# Altium footprint library FootPrintLib_9.PcbLib: 287 footprints (part 11 of 18)
Each footprint in its own frame and in the unit in brackets; x right, y up, seen from the top. Pads: shape width x height; smd on the part's side, far side on the other; paste and mask are expansions set on the pad; w line width, h text height; cw(c..) or ccw(c..) is an arc to the next point about the centre after c.
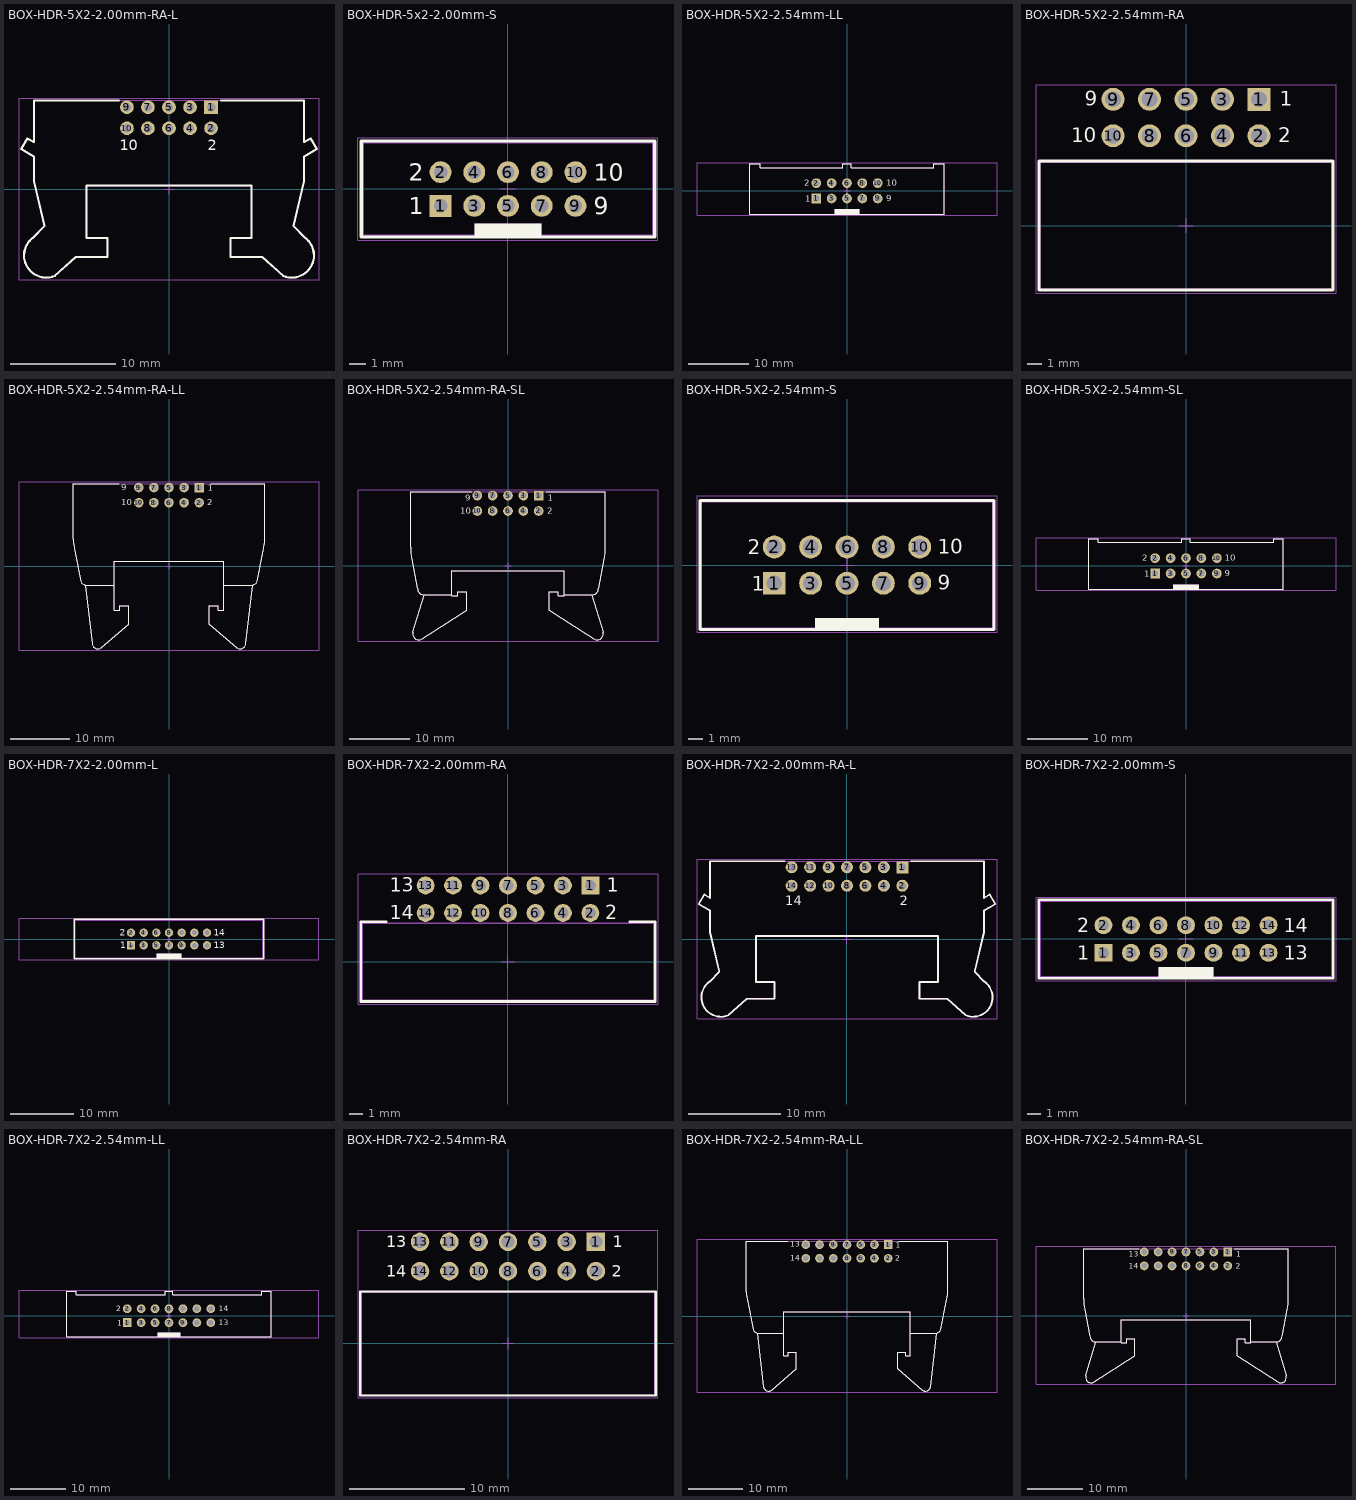
[diagram p10: the footprints below, top view; thin cyan lines are the x and y axes]

## BOX-HDR-5X2-2.00mm-RA-L [mm] "2.00mm Male Angled Box Header with Lever, 10p"
height 3.15
pads (10):
  rect 1.3x1.3 hole 0.8: 1(4,7.775)
  round 1.3 hole 0.8: 2(4,5.775) 3(2,7.775) 4(2,5.775) 5(0,7.775) 6(0,5.775) 7(-2,7.775) 8(-2,5.775) 9(-4,7.775) 10(-4,5.775)
Top Overlay:
  lines w0.2: -13.466,4.813 -14.06,3.785 -12.851,3.087 -12.851,0.753 ; -13.46,4.815 -12.848,4.462 ; -12.894,-4.611 ccw(c-11.68,-6.325) -10.865,-8.26 ; -12.892,-4.613 -11.85,-3.535 -12.837,0.738 ; -12.85,4.464 -12.85,8.425 -4.75,8.425 ; -10.866,-8.259 -8.85,-6.475 -5.85,-6.475 -5.85,-4.675 -7.85,-4.675 -7.85,0.325 7.85,0.325 7.85,-4.675 5.85,-4.675 5.85,-6.475 8.85,-6.475 10.866,-8.259 ; 4.95,8.425 12.85,8.425 12.85,4.464 ; 10.865,-8.26 ccw(c11.68,-6.325) 12.894,-4.611 ; 12.837,0.738 11.85,-3.535 12.892,-4.613 ; 12.848,4.462 13.46,4.815 ; 12.851,0.753 12.851,3.087 14.06,3.785 13.466,4.813
  text "10" at -4.7,3.675 h1.02
  text "2" at 3.7,3.675 h1.02
Mechanical 13:
  lines w0.1: -13.466,4.813 -14.06,3.785 -12.851,3.087 -12.851,0.753 ; -13.46,4.815 -12.848,4.462 ; -12.894,-4.611 ccw(c-11.68,-6.325) -10.865,-8.26 ; -12.892,-4.613 -11.85,-3.535 -12.837,0.738 ; -12.85,4.464 -12.85,8.425 12.85,8.425 ; -10.866,-8.259 -8.85,-6.475 -5.85,-6.475 -5.85,-4.675 -7.85,-4.675 -7.85,0.325 7.85,0.325 7.85,-4.675 5.85,-4.675 5.85,-6.475 8.85,-6.475 10.866,-8.259 ; 10.865,-8.26 ccw(c11.68,-6.325) 12.894,-4.611 ; 12.837,0.738 11.85,-3.535 12.892,-4.613 ; 12.848,4.462 13.46,4.815 ; 12.848,8.423 12.85,8.425 ; 12.85,4.464 12.85,8.425 ; 12.851,0.753 12.851,3.087 14.06,3.785 13.466,4.813
Mechanical 15:
  lines w0.05: -0.5,0 0.5,0 ; 0,-0.5 0,0.5 ; -14.262,-8.625 14.262,-8.625 14.262,8.625 -14.262,8.625 -14.262,-8.625
3D body "62501022121.stp": height 6.1, standoff -3.05, extent -14.062,-8.425 14.062,8.425

## BOX-HDR-5x2-2.00mm-S [mm] "2.00mm Male Box Header, 10p"
height 5.6
pads (10):
  rect 1.3x1.3 hole 0.8: 1(-4,-1)
  round 1.3 hole 0.8: 2(-4,1) 3(-2,-1) 4(-2,1) 5(0,-1) 6(0,1) 7(2,-1) 8(2,1) 9(4,-1) 10(4,1)
Top Overlay:
  rectangle: -2,-2.85 2,-2.05
  lines w0.2: -8.7,-2.85 8.7,-2.85 8.7,2.85 -8.7,2.85 -8.7,-2.85
  text "9" at 5.1,-1.5 h1.02
  text "1" at -5.9,-1.5 h1.02
  text "2" at -5.9,0.5 h1.02
  text "10" at 5.1,0.5 h1.02
Mechanical 13:
  rectangle: -2,-2.75 2,-2.05
  lines w0.1: -8.6,-2.75 -8.6,2.75 8.6,2.75 8.6,-2.75 -8.6,-2.75
Mechanical 15:
  lines w0.05: -0.5,0 0.5,0 ; 0,-0.5 0,0.5 ; -8.9,-3.05 -8.9,3.05 8.9,3.05 8.9,-3.05 -8.9,-3.05
3D body "62501021621.stp": height 5.65, standoff -2.5, extent -8.6,-2.75 8.6,2.75

## BOX-HDR-5X2-2.54mm-LL [mm] "10 pins, straight, long lever, gold plating"
height 28
pads (10):
  rect 1.6x1.6 hole 1.02: 1(-5.08,-1.27)
  round 1.6 hole 1.02: 2(-5.08,1.27) 3(-2.54,-1.27) 4(-2.54,1.27) 5(0,-1.27) 6(0,1.27) 7(2.54,-1.27) 8(2.54,1.27) 9(5.08,-1.27) 10(5.08,1.27)
Top Overlay:
  rectangle: -2.1,-3.85 2.1,-3.04
  lines w0.2: -16.1,-3.85 16.1,-3.85 16.1,4.45 14.37,4.45 14.37,3.85 0.7,3.85 0.7,4.45 -0.7,4.45 -0.7,3.85 -14.37,3.85 -14.37,4.45 -16.1,4.45 -16.1,-3.85
  text "9" at 6.5,-1.74 h1.02
  text "2" at -7.1,0.8 h1.02
  text "10" at 6.5,0.8 h1.02
  text "1" at -6.9,-1.8 h1.02
Mechanical 13:
  rectangle: -2.1,-3.85 2.1,-3.04
  lines w0.1: -16.1,-3.85 -16.1,4.45 -14.37,4.45 -14.37,3.85 -0.7,3.85 -0.7,4.45 0.7,4.45 0.7,3.85 14.37,3.85 14.37,4.45 16.1,4.45 16.1,-3.85 -16.1,-3.85
Mechanical 15:
  lines w0.05: -0.5,0 0.5,0 ; 0,-0.5 0,0.5 ; -24.8,-4.05 -24.8,4.65 24.8,4.65 24.8,-4.05 -24.8,-4.05
3D body "61201022821 (rev1).stp": height 27.84, standoff -3.35, extent -16.1,-3.86 16.1,4.45

## BOX-HDR-5X2-2.54mm-RA [mm] "10 pins, right angled, gold plating"
height 9.1
pads (10):
  rect 1.6x1.6 hole 1.1: 1(5.08,8.805)
  round 1.6 hole 1.1: 2(5.08,6.265) 3(2.54,8.805) 4(2.54,6.265) 5(0,8.805) 6(0,6.265) 7(-2.54,8.805) 8(-2.54,6.265) 9(-5.08,8.805) 10(-5.08,6.265)
Top Overlay:
  lines w0.2: -10.255,-4.5 -10.255,4.5 10.255,4.5 10.255,-4.5 -10.255,-4.5
  text "9" at -7.04,8.34 h1.02
  text "10" at -8,5.8 h1.02
  text "2" at 6.44,5.8 h1.02
  text "1" at 6.54,8.34 h1.02
Mechanical 13:
  lines w0.1: -10.18,-4.425 -10.18,4.425 10.18,4.425 10.18,-4.425 -10.18,-4.425
Mechanical 15:
  lines w0.05: -0.5,0 0.5,0 ; 0,-0.5 0,0.5 ; -10.455,-4.7 10.455,-4.7 10.455,9.805 -10.455,9.805 -10.455,-4.7
3D body "61201021721.stp": height 9.23, standoff -2.88, extent -10.18,-4.425 10.18,9.125

## BOX-HDR-5X2-2.54mm-RA-LL [mm] "10 pins, right angeled, long lever, gold plating"
height 10.8
pads (10):
  rect 1.6x1.6 hole 1.02: 1(5.08,13.23)
  round 1.6 hole 1.02: 2(5.08,10.69) 3(2.54,13.23) 4(2.54,10.69) 5(0,13.23) 6(0,10.69) 7(-2.54,13.23) 8(-2.54,10.69) 9(-5.08,13.23) 10(-5.08,10.69)
Top Overlay:
  lines w0.2: -16.1,4.54 -16.1,13.85 -8.4,13.85 ; -16.095,4.54 ccw(c-6.1,4.84) -15.854,2.636 -14.809,-2.534 ; -14.803,-2.533 ccw(c-13.88,-2.15) -13.88,-3.15 -9.2,-3.15 ; -14.064,-3.15 -12.918,-13.022 ccw(c-11.93,-12.87) -11.272,-13.623 -6.801,-9.758 ; -6.8,-9.76 -6.8,-6.66 -8.3,-6.66 -8.3,-7.37 -9.2,-7.37 -9.2,0.85 9.2,0.85 9.2,-7.37 8.3,-7.37 8.3,-6.66 6.8,-6.66 6.8,-9.76 ; 6.801,-9.758 11.273,-13.623 ccw(c11.93,-12.87) 12.918,-13.022 14.064,-3.15 ; 7.05,13.85 16.1,13.85 16.1,4.54 ; 9.2,-3.15 13.88,-3.15 ccw(c13.88,-2.15) 14.804,-2.533 ; 14.809,-2.534 15.854,2.636 ccw(c6.1,4.84) 16.096,4.54
  text "9" at -8,12.8 h1.02
  text "2" at 6.4,10.26 h1.02
  text "10" at -8,10.26 h1.02
  text "1" at 6.5,12.66 h1.02
Mechanical 13:
  lines w0.1: -16.1,4.54 -16.1,13.85 16.1,13.85 16.1,4.54 ; -16.095,4.54 ccw(c-6.1,4.84) -15.854,2.636 -14.809,-2.534 ; -14.803,-2.533 ccw(c-13.88,-2.15) -13.88,-3.15 -9.2,-3.15 ; -14.064,-3.15 -12.918,-13.022 ccw(c-11.93,-12.87) -11.272,-13.623 -6.801,-9.758 ; -6.8,-9.76 -6.8,-6.66 -8.3,-6.66 -8.3,-7.37 -9.2,-7.37 -9.2,0.85 9.2,0.85 9.2,-7.37 8.3,-7.37 8.3,-6.66 6.8,-6.66 6.8,-9.76 ; 6.801,-9.758 11.273,-13.623 ccw(c11.93,-12.87) 12.918,-13.022 14.064,-3.15 ; 9.2,-3.15 13.88,-3.15 ccw(c13.88,-2.15) 14.804,-2.533 ; 14.809,-2.534 15.854,2.636 ccw(c6.1,4.84) 16.096,4.54
Mechanical 15:
  lines w0.05: -0.5,0 0.5,0 ; 0,-0.5 0,0.5 ; -25.2,-14.06 25.2,-14.06 25.2,14.23 -25.2,14.23 -25.2,-14.06
3D body "61201022921 (rev1).stp": height 8.35, standoff -2.35, extent -16.1,-13.861 16.1,13.86

## BOX-HDR-5X2-2.54mm-RA-SL [mm] "10 pins, right angeled, short lever, gold plating"
height 8.3
pads (10):
  rect 1.6x1.6 hole 1.02: 1(5.08,11.63)
  round 1.6 hole 1.02: 2(5.08,9.09) 3(2.54,11.63) 4(2.54,9.09) 5(0,11.63) 6(0,9.09) 7(-2.54,11.63) 8(-2.54,9.09) 9(-5.08,11.63) 10(-5.08,9.09)
Top Overlay:
  lines w0.2: -14.964,-3.751 -15.906,1.138 cw(c-6.1,3.1) -16.1,3.1 -16.1,12.25 -6,12.25 ; -14.96,-3.75 ccw(c-13.96,-3.75) -13.96,-4.75 ; -14.055,-4.75 -9.3,-4.75 ; -13.874,-4.851 -15.707,-10.941 ccw(c-14.75,-11.23) -14.2,-12.066 -6.8,-7.33 -6.8,-4.23 -8.3,-4.23 -8.3,-4.94 -9.3,-4.94 -9.3,-0.75 9.3,-0.75 9.3,-4.94 8.3,-4.94 8.3,-4.23 6.8,-4.23 6.8,-7.33 14.2,-12.067 ccw(c14.75,-11.23) 15.707,-10.941 13.874,-4.851 ; 6.25,12.25 16.1,12.25 16.1,3.1 cw(c6.1,3.1) 15.906,1.138 14.964,-3.751 ; 9.3,-4.75 14.055,-4.75 ; 13.96,-4.75 ccw(c13.96,-3.75) 14.96,-3.75
  text "10" at -7.9,8.6 h1.02
  text "9" at -7.1,10.8 h1.02
  text "2" at 6.5,8.6 h1.02
  text "1" at 6.6,10.8 h1.02
Mechanical 13:
  lines w0.1: -14.964,-3.751 -15.906,1.138 cw(c-6.1,3.1) -16.1,3.1 -16.1,12.25 16.1,12.25 16.1,3.1 cw(c6.1,3.1) 15.906,1.138 14.964,-3.751 ; -14.96,-3.75 ccw(c-13.96,-3.75) -13.96,-4.75 ; -14.055,-4.75 -9.3,-4.75 ; -13.874,-4.851 -15.707,-10.941 ccw(c-14.75,-11.23) -14.2,-12.066 -6.8,-7.33 -6.8,-4.23 -8.3,-4.23 -8.3,-4.94 -9.3,-4.94 -9.3,-0.75 9.3,-0.75 9.3,-4.94 8.3,-4.94 8.3,-4.23 6.8,-4.23 6.8,-7.33 14.2,-12.067 ccw(c14.75,-11.23) 15.707,-10.941 13.874,-4.851 ; 9.3,-4.75 14.055,-4.75 ; 13.96,-4.75 ccw(c13.96,-3.75) 14.96,-3.75
Mechanical 15:
  lines w0.05: -0.5,0 0.5,0 ; 0,-0.5 0,0.5 ; -24.8,-12.45 24.8,-12.45 24.8,12.63 -24.8,12.63 -24.8,-12.45
3D body "61201022121.stp": height 8.35, standoff -3.35, extent -16.1,-12.25 16.1,12.25

## BOX-HDR-5X2-2.54mm-S [mm] "10 pins, straight, gold plating"
height 9.1
pads (10):
  rect 1.6x1.6 hole 1.1: 1(-5.08,-1.27)
  round 1.6 hole 1.1: 2(-5.08,1.27) 3(-2.54,-1.27) 4(-2.54,1.27) 5(0,-1.27) 6(0,1.27) 7(2.54,-1.27) 8(2.54,1.27) 9(5.08,-1.27) 10(5.08,1.27)
Top Overlay:
  rectangle: -2.25,-4.5 2.25,-3.7
  lines w0.2: -10.28,-4.5 -10.28,4.5 10.28,4.5 10.28,-4.5 -10.28,-4.5
  text "9" at 6.34,-1.74 h1.02
  text "10" at 6.34,0.8 h1.02
  text "2" at -6.94,0.74 h1.02
  text "1" at -6.64,-1.8 h1.02
Mechanical 13:
  rectangle: -2.25,-4.425 2.25,-3.7
  lines w0.1: -10.18,-4.425 10.18,-4.425 10.18,4.425 -10.18,4.425 -10.18,-4.425
Mechanical 15:
  lines w0.05: -0.5,0 0.5,0 ; 0,-0.5 0,0.5 ; -10.48,-4.7 -10.48,4.85 10.48,4.85 10.48,-4.7 -10.48,-4.7
3D body "61201021621.stp": height 9.13, standoff -2.98, extent -10.18,-4.425 10.18,4.75

## BOX-HDR-5X2-2.54mm-SL [mm] "10 pins, straight, short lever, gold plating"
height 24.5
pads (10):
  rect 1.6x1.6 hole 1.02: 1(-5.08,-1.27)
  round 1.6 hole 1.02: 2(-5.08,1.27) 3(-2.54,-1.27) 4(-2.54,1.27) 5(0,-1.27) 6(0,1.27) 7(2.54,-1.27) 8(2.54,1.27) 9(5.08,-1.27) 10(5.08,1.27)
Top Overlay:
  rectangle: -2.1,-3.85 2.1,-3.05
  lines w0.2: -0.7,4.45 0.7,4.45 0.7,3.85 14.45,3.85 14.45,4.45 16,4.45 16,-3.85 -16,-3.85 -16,4.45 -14.45,4.45 -14.45,3.85 -0.7,3.85 -0.7,4.45 ; -0.7,4.45 -0.7,4.45
  text "9" at 6.4,-1.74 h1.02
  text "1" at -6.9,-1.8 h1.02
  text "10" at 6.4,0.8 h1.02
  text "2" at -7.2,0.8 h1.02
Mechanical 13:
  rectangle: -2.1,-3.85 2.1,-3.05
  lines w0.1: -0.7,4.45 -0.7,3.85 -14.45,3.85 -14.45,4.45 -16,4.45 -16,-3.85 16,-3.85 16,4.45 14.45,4.45 14.45,3.85 0.7,3.85 0.7,4.45 -0.7,4.45 ; -0.7,4.45 -0.7,4.45
Mechanical 15:
  lines w0.05: -0.5,0 0.5,0 ; 0,-0.5 0,0.5 ; -24.7,-4.05 24.7,-4.05 24.7,4.65 -24.7,4.65 -24.7,-4.05
3D body "61201022021.stp": height 24.55, standoff -3.35, extent -16.1,-3.85 16.1,4.45

## BOX-HDR-7X2-2.00mm-L [mm] "2.00mm Male Box Header with Lever, 14p"
height 16.85
pads (14):
  rect 1.3x1.3 hole 0.8: 1(-6,-1)
  round 1.3 hole 0.8: 2(-6,1) 3(-4,-1) 4(-4,1) 5(-2,-1) 6(-2,1) 7(0,-1) 8(0,1) 9(2,-1) 10(2,1) 11(4,-1) 12(4,1) 13(6,-1) 14(6,1)
Top Overlay:
  rectangle: -2,-3.1 2,-2.3
  lines w0.2: -15,-3.1 -15,3.1 15,3.1 15,-3.1 -15,-3.1
  text "1" at -7.7,-1.5 h1.02
  text "2" at -7.8,0.5 h1.02
  text "14" at 7.1,0.5 h1.02
  text "13" at 7.1,-1.5 h1.02
Mechanical 13:
  rectangle: -2,-3 2,-2.3
  lines w0.1: -14.85,-3 -14.85,3 14.85,3 14.85,-3 -14.85,-3
Mechanical 15:
  lines w0.05: -0.5,0 0.5,0 ; 0,-0.5 0,0.5 ; -23.7,-3.3 23.7,-3.3 23.7,3.3 -23.7,3.3 -23.7,-3.3
3D body "62501422021.stp": height 16.9, standoff -2.95, extent -16.062,-3 16.063,3

## BOX-HDR-7X2-2.00mm-RA [mm] "2.00mm Male Angled Box Header, 14p"
height 5.4
pads (14):
  rect 1.3x1.3 hole 0.8: 1(6,5.55)
  round 1.3 hole 0.8: 2(6,3.55) 3(4,5.55) 4(4,3.55) 5(2,5.55) 6(2,3.55) 7(0,5.55) 8(0,3.55) 9(-2,5.55) 10(-2,3.55) 11(-4,5.55) 12(-4,3.55) 13(-6,5.55) 14(-6,3.55)
Top Overlay:
  lines w0.2: -8.875,2.9 -10.725,2.9 -10.725,-2.9 10.725,-2.9 10.725,2.9 8.875,2.9
  text "1" at 7.2,5.075 h1.02
  text "2" at 7.1,3.075 h1.02
  text "14" at -8.6,3.075 h1.02
  text "13" at -8.6,5.075 h1.02
Mechanical 13:
  lines w0.1: -10.6,-2.8 -10.6,2.8 10.6,2.8 10.6,-2.8 -10.6,-2.8
Mechanical 15:
  lines w0.05: -0.5,0 0.5,0 ; 0,-0.5 0,0.5 ; -10.925,-3.1 -10.925,6.4 10.925,6.4 10.925,-3.1 -10.925,-3.1
3D body "62501421721 (rev1).stp": height 5.5, standoff -2.85, extent -10.6,-2.8 10.6,5.8

## BOX-HDR-7X2-2.00mm-RA-L [mm] "2.00mm Male Angled Box Header with Lever, 14p"
height 3.15
pads (14):
  rect 1.3x1.3 hole 0.8: 1(6,7.775)
  round 1.3 hole 0.8: 2(6,5.775) 3(4,7.775) 4(4,5.775) 5(2,7.775) 6(2,5.775) 7(0,7.775) 8(0,5.775) 9(-2,7.775) 10(-2,5.775) 11(-4,7.775) 12(-4,5.775) 13(-6,7.775) 14(-6,5.775)
Top Overlay:
  lines w0.2: -15.466,4.813 -16.06,3.785 -14.851,3.087 -14.851,0.753 ; -15.46,4.815 -14.848,4.462 ; -14.894,-4.611 ccw(c-13.68,-6.325) -12.865,-8.26 ; -14.892,-4.613 -13.85,-3.535 -14.837,0.738 ; -14.85,4.464 -14.85,8.425 -6.75,8.425 ; -12.866,-8.259 -10.85,-6.475 -7.85,-6.475 -7.85,-4.675 -9.85,-4.675 -9.85,0.325 9.85,0.325 9.85,-4.675 7.85,-4.675 7.85,-6.475 10.85,-6.475 12.866,-8.259 ; 6.95,8.425 14.85,8.425 14.85,4.464 ; 12.865,-8.26 ccw(c13.68,-6.325) 14.894,-4.611 ; 14.837,0.738 13.85,-3.535 14.892,-4.613 ; 14.848,4.462 15.46,4.815 ; 14.851,0.753 14.851,3.087 16.06,3.785 15.466,4.813
  text "2" at 5.7,3.675 h1.02
  text "14" at -6.7,3.675 h1.02
Mechanical 13:
  lines w0.1: -15.466,4.813 -16.06,3.785 -14.851,3.087 -14.851,0.753 ; -15.46,4.815 -14.848,4.462 ; -14.894,-4.611 ccw(c-13.68,-6.325) -12.865,-8.26 ; -14.892,-4.613 -13.85,-3.535 -14.837,0.738 ; -14.85,4.464 -14.85,8.425 14.85,8.425 ; -12.866,-8.259 -10.85,-6.475 -7.85,-6.475 -7.85,-4.675 -9.85,-4.675 -9.85,0.325 9.85,0.325 9.85,-4.675 7.85,-4.675 7.85,-6.475 10.85,-6.475 12.866,-8.259 ; 12.865,-8.26 ccw(c13.68,-6.325) 14.894,-4.611 ; 14.837,0.738 13.85,-3.535 14.892,-4.613 ; 14.848,4.462 15.46,4.815 ; 14.848,8.423 14.85,8.425 ; 14.85,4.464 14.85,8.425 ; 14.851,0.753 14.851,3.087 16.06,3.785 15.466,4.813
Mechanical 15:
  lines w0.05: -0.5,0 0.5,0 ; 0,-0.5 0,0.5 ; -16.262,-8.625 -16.262,8.625 16.262,8.625 16.262,-8.625 -16.262,-8.625
3D body "62501422121.stp": height 6.1, standoff -3.05, extent -16.062,-8.425 16.062,8.425

## BOX-HDR-7X2-2.00mm-S [mm] "2.00mm Male Box Header, 14p"
height 5.6
pads (14):
  rect 1.3x1.3 hole 0.8: 1(-6,-1)
  round 1.3 hole 0.8: 2(-6,1) 3(-4,-1) 4(-4,1) 5(-2,-1) 6(-2,1) 7(0,-1) 8(0,1) 9(2,-1) 10(2,1) 11(4,-1) 12(4,1) 13(6,-1) 14(6,1)
Top Overlay:
  rectangle: -2,-2.85 2,-2.05
  lines w0.2: -10.7,-2.85 10.7,-2.85 10.7,2.85 -10.7,2.85 -10.7,-2.85
  text "1" at -7.9,-1.5 h1.02
  text "2" at -7.9,0.5 h1.02
  text "13" at 7.1,-1.5 h1.02
  text "14" at 7.1,0.5 h1.02
Mechanical 13:
  rectangle: -2,-2.75 2,-2.05
  lines w0.1: -10.6,-2.75 -10.6,2.75 10.6,2.75 10.6,-2.75 -10.6,-2.75
Mechanical 15:
  lines w0.05: -0.5,0 0.5,0 ; 0,-0.5 0,0.5 ; -10.9,-3.05 -10.9,3.05 10.9,3.05 10.9,-3.05 -10.9,-3.05
3D body "62501421621.stp": height 5.65, standoff -2.5, extent -10.6,-2.75 10.6,2.75

## BOX-HDR-7X2-2.54mm-LL [mm] "14 pins, straight, long lever, gold plating"
height 28
pads (14):
  rect 1.6x1.6 hole 1.02: 1(-7.62,-1.27)
  round 1.6 hole 1.02: 2(-7.62,1.27) 3(-5.08,-1.27) 4(-5.08,1.27) 5(-2.54,-1.27) 6(-2.54,1.27) 7(0,-1.27) 8(0,1.27) 9(2.54,-1.27) 10(2.54,1.27) 11(5.08,-1.27) 12(5.08,1.27) 13(7.62,-1.27) 14(7.62,1.27)
Top Overlay:
  rectangle: -2.1,-3.85 2.1,-3.04
  lines w0.2: -18.64,-3.85 -18.64,4.45 -16.91,4.45 -16.91,3.85 -0.7,3.85 -0.7,4.45 0.7,4.45 0.7,3.85 16.91,3.85 16.91,4.45 18.64,4.45 18.64,-3.85 -18.64,-3.85
  text "2" at -9.64,0.8 h1.02
  text "1" at -9.44,-1.8 h1.02
  text "14" at 9.04,0.8 h1.02
  text "13" at 9.04,-1.74 h1.02
Mechanical 13:
  rectangle: -2.1,-3.85 2.1,-3.04
  lines w0.1: -18.64,-3.85 18.64,-3.85 18.64,4.45 16.91,4.45 16.91,3.85 0.7,3.85 0.7,4.45 -0.7,4.45 -0.7,3.85 -16.91,3.85 -16.91,4.45 -18.64,4.45 -18.64,-3.85
Mechanical 15:
  lines w0.05: -0.5,0 0.5,0 ; 0,-0.5 0,0.5 ; -27.34,-4.05 -27.34,4.65 27.34,4.65 27.34,-4.05 -27.34,-4.05
3D body "61201422821 (rev1).stp": height 27.84, standoff -3.35, extent -18.64,-3.86 18.64,4.45

## BOX-HDR-7X2-2.54mm-RA [mm] "14 pins, right angled, gold plating"
height 9.1
pads (14):
  rect 1.6x1.6 hole 1.1: 1(7.62,8.805)
  round 1.6 hole 1.1: 2(7.62,6.265) 3(5.08,8.805) 4(5.08,6.265) 5(2.54,8.805) 6(2.54,6.265) 7(0,8.805) 8(0,6.265) 9(-2.54,8.805) 10(-2.54,6.265) 11(-5.08,8.805) 12(-5.08,6.265) 13(-7.62,8.805) 14(-7.62,6.265)
Top Overlay:
  lines w0.2: -12.795,-4.5 -12.795,4.5 12.795,4.5 12.795,-4.5 -12.795,-4.5
  text "14" at -10.54,5.8 h1.02
  text "13" at -10.54,8.34 h1.02
  text "2" at 8.98,5.8 h1.02
  text "1" at 9.08,8.34 h1.02
Mechanical 13:
  lines w0.1: -12.72,-4.425 -12.72,4.425 12.72,4.425 12.72,-4.425 -12.72,-4.425
Mechanical 15:
  lines w0.05: -0.5,0 0.5,0 ; 0,-0.5 0,0.5 ; -12.995,-4.7 12.995,-4.7 12.995,9.805 -12.995,9.805 -12.995,-4.7
3D body "61201421721.stp": height 9.23, standoff -2.88, extent -12.72,-4.425 12.72,9.125

## BOX-HDR-7X2-2.54mm-RA-LL [mm] "14 pins, right angeled, long lever, gold plating"
height 10.8
pads (14):
  rect 1.6x1.6 hole 1.02: 1(7.62,13.23)
  round 1.6 hole 1.02: 2(7.62,10.69) 3(5.08,13.23) 4(5.08,10.69) 5(2.54,13.23) 6(2.54,10.69) 7(0,13.23) 8(0,10.69) 9(-2.54,13.23) 10(-2.54,10.69) 11(-5.08,13.23) 12(-5.08,10.69) 13(-7.62,13.23) 14(-7.62,10.69)
Top Overlay:
  lines w0.2: -18.64,4.54 -18.64,13.85 -10.94,13.85 ; -18.635,4.54 ccw(c-8.64,4.84) -18.394,2.636 -17.349,-2.534 ; -17.343,-2.533 ccw(c-16.42,-2.15) -16.42,-3.15 -11.74,-3.15 ; -16.604,-3.15 -15.458,-13.022 ccw(c-14.47,-12.87) -13.812,-13.623 -9.341,-9.758 ; -9.34,-9.76 -9.34,-6.66 -10.84,-6.66 -10.84,-7.37 -11.74,-7.37 -11.74,0.85 11.74,0.85 11.74,-7.37 10.84,-7.37 10.84,-6.66 9.34,-6.66 9.34,-9.76 ; 9.341,-9.758 13.813,-13.623 ccw(c14.47,-12.87) 15.458,-13.022 16.604,-3.15 ; 9.59,13.85 18.64,13.85 18.64,4.54 ; 11.74,-3.15 16.42,-3.15 ccw(c16.42,-2.15) 17.344,-2.533 ; 17.349,-2.534 18.394,2.636 ccw(c8.64,4.84) 18.636,4.54
  text "1" at 9.04,12.66 h1.02
  text "2" at 8.94,10.26 h1.02
  text "13" at -10.54,12.8 h1.02
  text "14" at -10.54,10.26 h1.02
Mechanical 13:
  lines w0.1: -18.64,4.54 -18.64,13.85 18.64,13.85 18.64,4.54 ; -18.635,4.54 ccw(c-8.64,4.84) -18.394,2.636 -17.349,-2.534 ; -17.343,-2.533 ccw(c-16.42,-2.15) -16.42,-3.15 -11.74,-3.15 ; -16.604,-3.15 -15.458,-13.022 ccw(c-14.47,-12.87) -13.812,-13.623 -9.341,-9.758 ; -9.34,-9.76 -9.34,-6.66 -10.84,-6.66 -10.84,-7.37 -11.74,-7.37 -11.74,0.85 11.74,0.85 11.74,-7.37 10.84,-7.37 10.84,-6.66 9.34,-6.66 9.34,-9.76 ; 9.341,-9.758 13.813,-13.623 ccw(c14.47,-12.87) 15.458,-13.022 16.604,-3.15 ; 11.74,-3.15 16.42,-3.15 ccw(c16.42,-2.15) 17.344,-2.533 ; 17.349,-2.534 18.394,2.636 ccw(c8.64,4.84) 18.636,4.54
Mechanical 15:
  lines w0.05: -0.5,0 0.5,0 ; 0,-0.5 0,0.5 ; -27.74,-14.06 -27.74,14.23 27.74,14.23 27.74,-14.06 -27.74,-14.06
3D body "61201422921 (rev1).stp": height 8.35, standoff -2.35, extent -18.64,-13.871 18.64,13.85

## BOX-HDR-7X2-2.54mm-RA-SL [mm] "14 pins, right angeled, short lever, gold plating"
height 8.3
pads (14):
  rect 1.6x1.6 hole 1.02: 1(7.62,11.63)
  round 1.6 hole 1.02: 2(7.62,9.09) 3(5.08,11.63) 4(5.08,9.09) 5(2.54,11.63) 6(2.54,9.09) 7(0,11.63) 8(0,9.09) 9(-2.54,11.63) 10(-2.54,9.09) 11(-5.08,11.63) 12(-5.08,9.09) 13(-7.62,11.63) 14(-7.62,9.09)
Top Overlay:
  lines w0.2: -17.504,-3.751 -18.446,1.138 cw(c-8.64,3.1) -18.64,3.1 -18.64,12.25 -8.54,12.25 ; -17.5,-3.75 ccw(c-16.5,-3.75) -16.5,-4.75 ; -16.595,-4.75 -11.84,-4.75 ; -16.414,-4.851 -18.247,-10.941 ccw(c-17.29,-11.23) -16.74,-12.066 -9.34,-7.33 -9.34,-4.23 -10.84,-4.23 -10.84,-4.94 -11.84,-4.94 -11.84,-0.75 11.84,-0.75 11.84,-4.94 10.84,-4.94 10.84,-4.23 9.34,-4.23 9.34,-7.33 16.74,-12.067 ccw(c17.29,-11.23) 18.247,-10.941 16.414,-4.851 ; 8.79,12.25 18.64,12.25 18.64,3.1 cw(c8.64,3.1) 18.446,1.138 17.504,-3.751 ; 11.84,-4.75 16.595,-4.75 ; 16.5,-4.75 ccw(c16.5,-3.75) 17.5,-3.75
  text "2" at 9.04,8.6 h1.02
  text "1" at 9.14,10.8 h1.02
  text "13" at -10.44,10.8 h1.02
  text "14" at -10.44,8.6 h1.02
Mechanical 13:
  lines w0.1: -17.504,-3.751 -18.446,1.138 cw(c-8.64,3.1) -18.64,3.1 -18.64,12.25 18.64,12.25 18.64,3.1 cw(c8.64,3.1) 18.446,1.138 17.504,-3.751 ; -17.5,-3.75 ccw(c-16.5,-3.75) -16.5,-4.75 ; -16.595,-4.75 -11.84,-4.75 ; -16.414,-4.851 -18.247,-10.941 ccw(c-17.29,-11.23) -16.74,-12.066 -9.34,-7.33 -9.34,-4.23 -10.84,-4.23 -10.84,-4.94 -11.84,-4.94 -11.84,-0.75 11.84,-0.75 11.84,-4.94 10.84,-4.94 10.84,-4.23 9.34,-4.23 9.34,-7.33 16.74,-12.067 ccw(c17.29,-11.23) 18.247,-10.941 16.414,-4.851 ; 11.84,-4.75 16.595,-4.75 ; 16.5,-4.75 ccw(c16.5,-3.75) 17.5,-3.75
Mechanical 15:
  lines w0.05: -0.5,0 0.5,0 ; 0,-0.5 0,0.5 ; -27.34,-12.45 27.34,-12.45 27.34,12.63 -27.34,12.63 -27.34,-12.45
3D body "61201422121.stp": height 8.35, standoff -3.35, extent -18.64,-12.25 18.64,12.25